# EAGLE library part IC_UC_ATTINY85 (library dp_devices.v6)
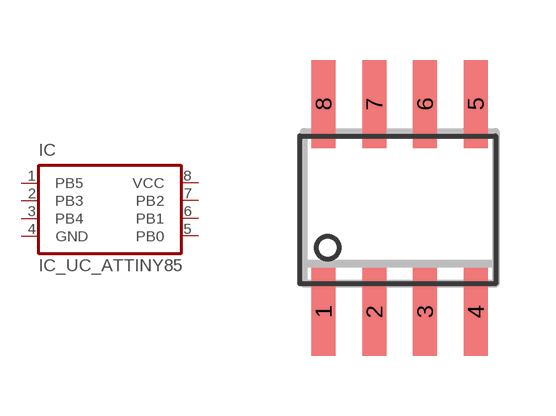
[diagram p159: symbol with the pads of SOIC-8; footprint SOIC-8]

Designator prefix IC

## IC_UC_ATTINY85  [SOIC-8]
1  PB5
2  PB3
3  PB4
4  GND  pwr
5  PB0
6  PB1
7  PB2
8  VCC  pwr

## Footprint SOIC-8 (pad centres in mm)
smd 0.6 x 2.2: 1 -1.905,-2.6; 2 -0.635,-2.6; 3 0.635,-2.6; 4 1.905,-2.6; 5 1.905,2.6; 6 0.635,2.6; 7 -0.635,2.6; 8 -1.905,2.6